# Altium integrated library SMBJ16A-13-F.IntLib: 1 symbol
Pins are listed as number, name and electrical type; pins without a type are passive.

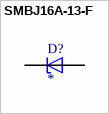
[diagram p0: symbol SMBJ16A-13-F]

## SMBJ16A-13-F
designator D?
MF: {'manufacturer': u'Diodes Incorporated'}; MP: SMBJ16A-13-F; Package: None; Price: None; Value: *; Availability: Unavailable
footprint DIOM5336X250N
pins: 1 C, 2 A